# Altium schematic symbol library EMH4T2R.SchLib: 1 symbol
Pins are listed as number, name and electrical type; pins without a type are passive.

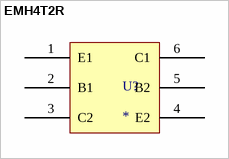
[diagram p0: symbol EMH4T2R]

## EMH4T2R
designator U?
Dual NPN digital transistor with built-in bias resistors, 50V, 100mA, SOT-563 (EMT6) package.
footprint SOT50P160X55-6N
pins: 1 E1, 2 B1, 3 C2, 4 E2, 5 B2, 6 C1